# Altium schematic symbol library TBD62083AFNG_EL.SchLib: 1 symbol
Pins are listed as number, name and electrical type; pins without a type are passive.

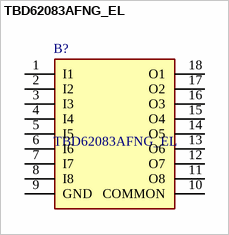
[diagram p0: symbol TBD62083AFNG_EL]

## TBD62083AFNG_EL
designator B?
BiCD Integrated Circuit Silicon Monolithic; Manufacturer_Name: Toshiba; Manufacturer_Part_Number: TBD62083AFNG,EL; Geometry.Height: 2.45mm; Mouser Part Number: 757-TBD62083AFNGEL; Mouser Price/Stock: https://www.mouser.co.uk/ProductDetail/Toshiba/TBD62083AFNGEL?qs=fSnNYG2PaKLeeuoLxGSskQ%3D%3D; Datasheet Link: https://toshiba.semicon-storage.com/info/docget.jsp?did=29893&prodName=TBD62083AFG
footprint SOIC127P1030X245-18N
pins: 1 I1, 2 I2, 3 I3, 4 I4, 5 I5, 6 I6, 7 I7, 8 I8, 9 GND, 10 COMMON, 11 O8, 12 O7, 13 O6, 14 O5, 15 O4, 16 O3, 17 O2, 18 O1